# Altium schematic symbol library PCB-PWR.SchLib: 15 symbols
Pins are listed as number, name and electrical type; pins without a type are passive.

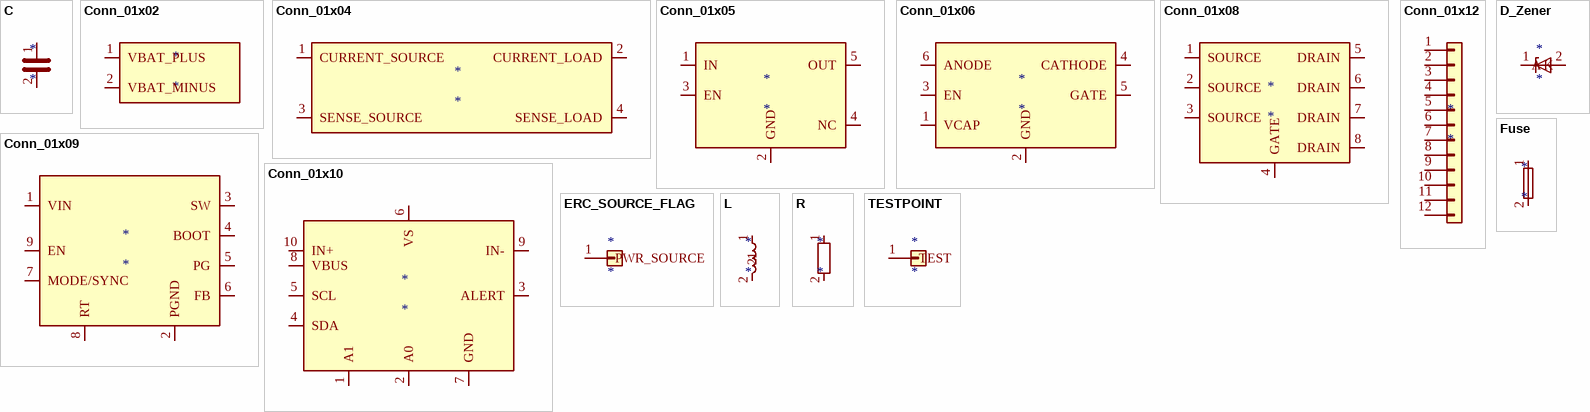
[diagram p0: symbols C to TESTPOINT]

## C
designator *
pins: 1, 2

## Conn_01x02
designator *
pins: 1 VBAT_PLUS, 2 VBAT_MINUS

## Conn_01x04
designator *
pins: 1 CURRENT_SOURCE, 2 CURRENT_LOAD, 3 SENSE_SOURCE, 4 SENSE_LOAD

## Conn_01x05
designator *
pins: 1 IN, 2 GND, 3 EN, 4 NC, 5 OUT

## Conn_01x06
designator *
pins: 1 VCAP, 2 GND, 3 EN, 4 CATHODE, 5 GATE, 6 ANODE

## Conn_01x08
designator *
pins: 1 SOURCE, 2 SOURCE, 3 SOURCE, 4 GATE, 5 DRAIN, 6 DRAIN, 7 DRAIN, 8 DRAIN

## Conn_01x09
designator *
pins: 1 VIN, 2 PGND, 3 SW, 4 BOOT, 5 PG, 6 FB, 7 MODE/SYNC, 8 RT, 9 EN

## Conn_01x10
designator *
pins: 1 A1, 2 A0, 3 ALERT, 4 SDA, 5 SCL, 6 VS, 7 GND, 8 VBUS, 9 IN-, 10 IN+

## Conn_01x12
designator *
pins: 1 3V8_MODEM, 2 GND_MODEM, 3 3V3_DIGITAL, 4 GND_DIGITAL, 5 1V8_MIC, 6 GND_MIC, 7 PWR_GOOD, 8 FAULT, 9 EN_MODEM, 10 EN_AUX, 11 I2C2_SCL, 12 I2C2_SDA

## D_Zener
designator *
pins: 1 K, 2 A

## ERC_SOURCE_FLAG
designator *
pins: 1 PWR_SOURCE

## Fuse
designator *
pins: 1, 2

## L
designator *
pins: 1, 2

## R
designator *
pins: 1, 2

## TESTPOINT
designator *
pins: 1 TEST